# Altium schematic symbol library 2020-05-10_15-02-10.SchLib: 2 symbols
Pins are listed as number, name and electrical type; pins without a type are passive.

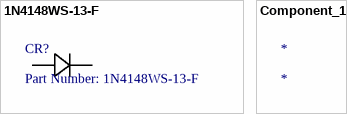
[diagram p0: symbols 1N4148WS-13-F to Component_1]

## 1N4148WS-13-F
designator CR?, comment Part Number: 1N4148WS-13-F
No Description Available; Vendor: Diodes Inc; Built_By: EMA_UL_Team; SourceLibrary: DiodesInc_2015-05-08; Type: DEV; Manufacturer_Part_Number: 1N4148WS-13-F; Copyright: Copyright (C) 2018 Accelerated Designs. All rights reserved; RefDes: RefDes; Value: Value
footprint SOD323_DIO
pins: 1, 2

## Component_1
designator *